# Altium schematic symbol library SIT3485EESA.SchLib: 1 symbol
Pins are listed as number, name and electrical type; pins without a type are passive.

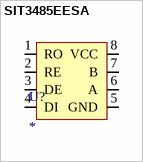
[diagram p0: symbol SIT3485EESA]

## SIT3485EESA
designator U?
footprint SOIC127P600X175-8N
pins: 1 RO, 2 RE, 3 DE, 4 DI, 5 GND, 6 A, 7 B, 8 VCC